# EAGLE library part XPH4R714MC,L1XHQ (library XPH4R714MC_L1XHQ)
MOSFET 132W 1MHz Automotive; AEC-Q101 Source: Datasheet <https://toshiba.semicon-storage.com/info/docget.jsp?did=66018&prodName=XPH4R714MC>
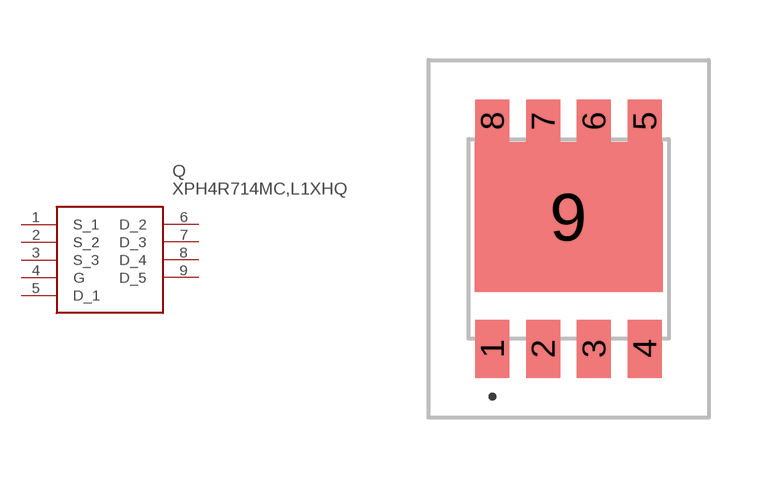
[diagram p0: symbol with the pads of XPH4R714MC; footprint XPH4R714MC]

Designator prefix Q

## XPH4R714MC,L1XHQ (Description: MOSFET 132W 1MHz Automotive; AEC-Q101; Height: mm; Manufacturer_Name: Toshiba; Manufacturer_Part_Number: XPH4R714MC,L1XHQ; Mouser_Part_Number: 757-XPH4R714MC,L1XHQ; Mouser_Price-Stock: https://www.mouser.co.uk/ProductDetail/Toshiba/XPH4R714MCL1XHQ?qs=7MVldsJ5Uay5UfLPuZnPLQ%3D%3D)  [XPH4R714MC]
1  S_1
2  S_2
3  S_3
4  G
5  D_1
6  D_2
7  D_3
8  D_4
9  D_5

## Footprint XPH4R714MC (pad centres in mm)
SOP Advance(WF)_2022-1
smd 0.85 x 1.45: 1 -1.905,0; 2 -0.635,0; 3 0.635,0; 4 1.905,0
smd 0.85 x 1.05: 5 1.905,5.7; 6 0.635,5.7; 7 -0.635,5.7; 8 -1.905,5.7
smd 4.7 x 3.75: 9 0,3.3